# Altium footprint library Components.PcbLib: 82 footprints (part 4 of 6)
Each footprint in its own frame and in the unit in brackets; x right, y up, seen from the top. Pads: shape width x height; smd on the part's side, far side on the other; paste and mask are expansions set on the pad; w line width, h text height; cw(c..) or ccw(c..) is an arc to the next point about the centre after c.
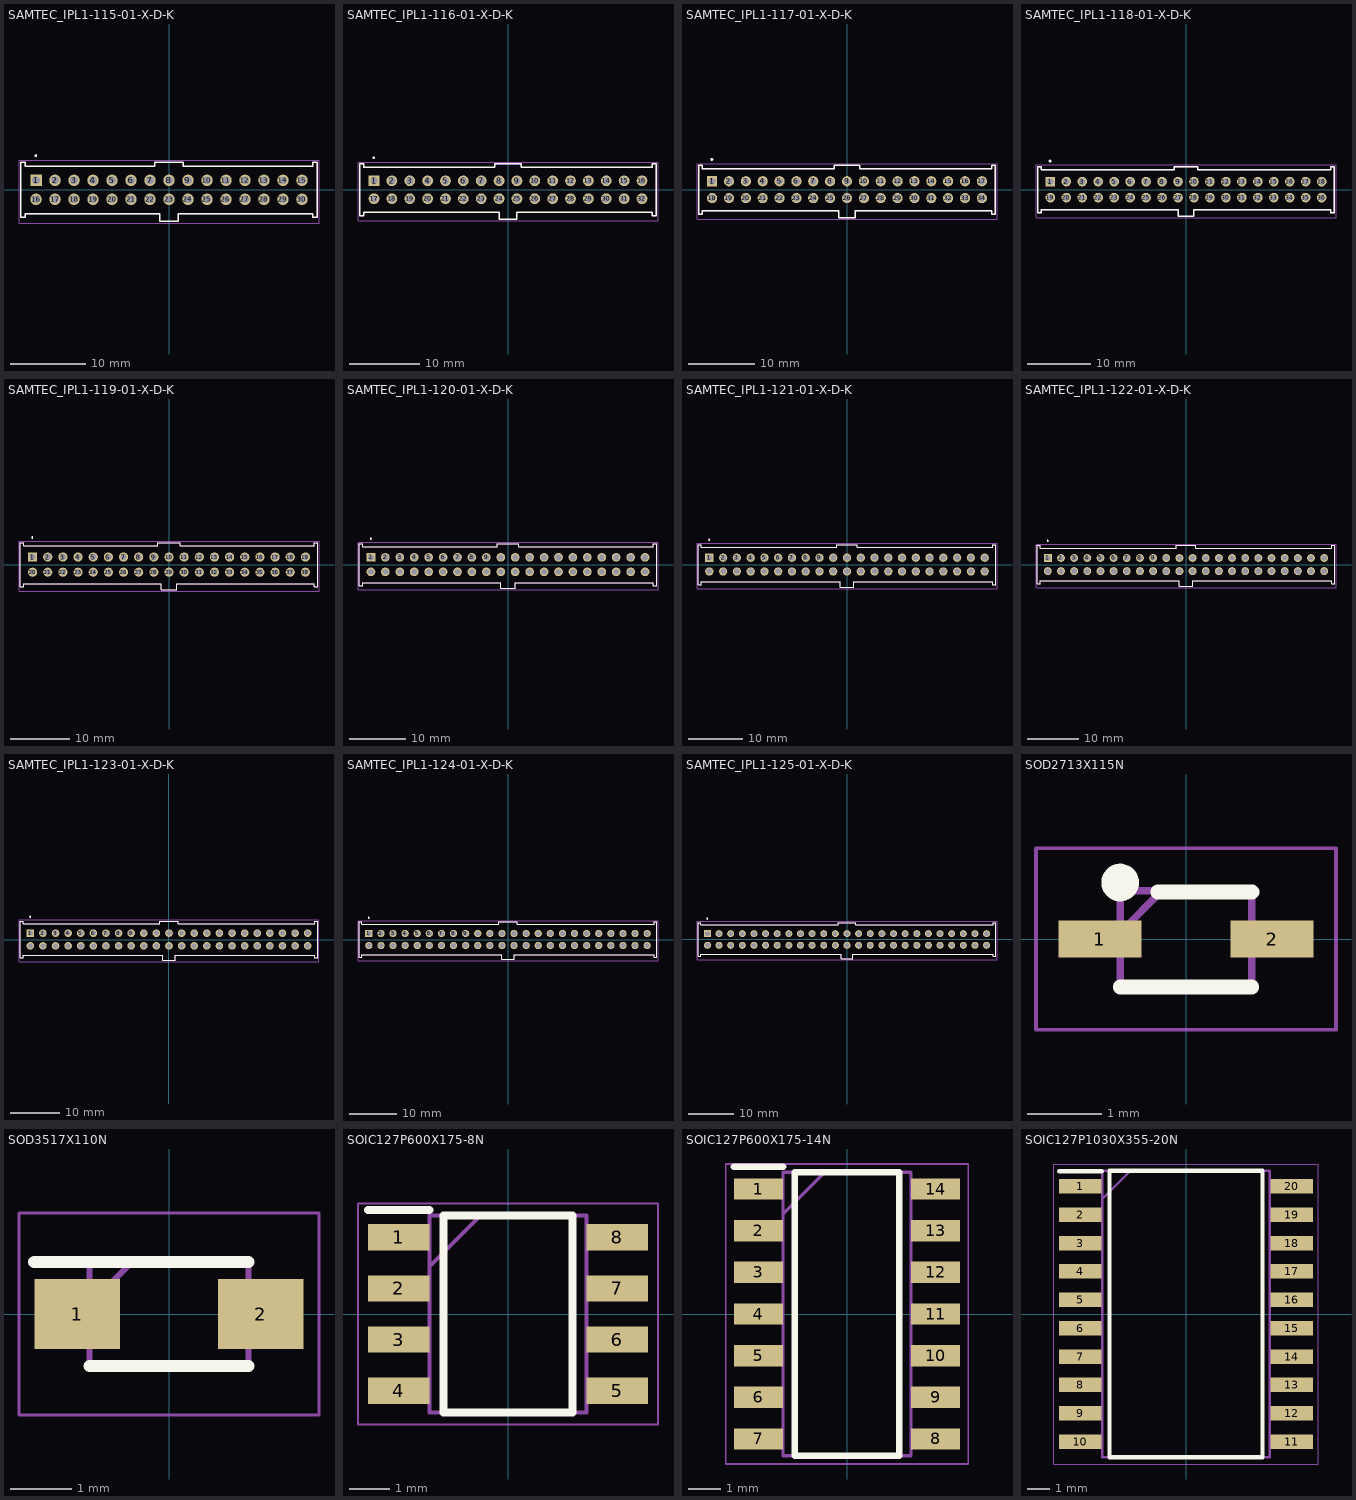
[diagram p3: the footprints below, top view; thin cyan lines are the x and y axes]

## SAMTEC_IPL1-115-01-X-D-K [mm] "Samtec IPL1-115-01-X-D-K, Mini Mate 2.54 mm double row vertical TH shrouded header, keyed"
pads (30):
  rect 1.53x1.53 hole 1.02: 1(-17.78,1.27)
  round 1.53 hole 1.02: 2(-15.24,1.27) 3(-12.7,1.27) 4(-10.16,1.27) 5(-7.62,1.27) 6(-5.08,1.27) 7(-2.54,1.27) 8(0,1.27) 9(2.54,1.27) 10(5.08,1.27) 11(7.62,1.27) 12(10.16,1.27) 13(12.7,1.27) 14(15.24,1.27) 15(17.78,1.27) 16(-17.78,-1.27) 17(-15.24,-1.27) 18(-12.7,-1.27) 19(-10.16,-1.27) 20(-7.62,-1.27) 21(-5.08,-1.27) 22(-2.54,-1.27) 23(0,-1.27) 24(2.54,-1.27) 25(5.08,-1.27) 26(7.62,-1.27) 27(10.16,-1.27) 28(12.7,-1.27) 29(15.24,-1.27) 30(17.78,-1.27)
Top Overlay:
  circle w0.2: c-17.82,4.555 r0.1
  lines w0.2: -19.81,-3.685 -19.81,3.685 -19.24,3.685 -19.24,3.175 -1.905,3.175 -1.905,3.685 1.905,3.685 1.905,3.175 19.24,3.175 19.24,3.685 19.81,3.685 19.81,-3.685 19.24,-3.685 19.24,-3.175 1.27,-3.175 1.27,-4.195 -1.27,-4.195 -1.27,-3.175 -19.24,-3.175 -19.24,-3.685 -19.81,-3.685
Mechanical 13:
  circle w0.2: c-17.82,4.555 r0.1
  lines w0.1: -19.81,-3.685 -19.81,3.685 -19.24,3.685 -19.24,3.175 -1.905,3.175 -1.905,3.685 1.905,3.685 1.905,3.175 19.24,3.175 19.24,3.685 19.81,3.685 19.81,-3.685 19.24,-3.685 19.24,-3.175 1.27,-3.175 1.27,-4.195 -1.27,-4.195 -1.27,-3.175 -19.24,-3.175 -19.24,-3.685 -19.81,-3.685
Mechanical 15:
  lines w0.05: -20.06,-4.445 -20.06,3.935 20.06,3.935 20.06,-4.445 -20.06,-4.445
3D body "IPL1-115-01-L-D-K.stp": height 8.13, standoff -3.05, extent -19.812,-4.191 19.812,3.683

## SAMTEC_IPL1-116-01-X-D-K [mm] "Samtec IPL1-116-01-X-D-K, Mini Mate 2.54 mm double row vertical TH shrouded header, keyed"
pads (32):
  rect 1.53x1.53 hole 1.02: 1(-19.05,1.27)
  round 1.53 hole 1.02: 2(-16.51,1.27) 3(-13.97,1.27) 4(-11.43,1.27) 5(-8.89,1.27) 6(-6.35,1.27) 7(-3.81,1.27) 8(-1.27,1.27) 9(1.27,1.27) 10(3.81,1.27) 11(6.35,1.27) 12(8.89,1.27) 13(11.43,1.27) 14(13.97,1.27) 15(16.51,1.27) 16(19.05,1.27) 17(-19.05,-1.27) 18(-16.51,-1.27) 19(-13.97,-1.27) 20(-11.43,-1.27) 21(-8.89,-1.27) 22(-6.35,-1.27) 23(-3.81,-1.27) 24(-1.27,-1.27) 25(1.27,-1.27) 26(3.81,-1.27) 27(6.35,-1.27) 28(8.89,-1.27) 29(11.43,-1.27) 30(13.97,-1.27) 31(16.51,-1.27) 32(19.05,-1.27)
Top Overlay:
  circle w0.2: c-19.09,4.555 r0.1
  lines w0.2: -21.08,-3.685 -21.08,3.685 -20.51,3.685 -20.51,3.175 -1.905,3.175 -1.905,3.685 1.905,3.685 1.905,3.175 20.51,3.175 20.51,3.685 21.08,3.685 21.08,-3.685 20.51,-3.685 20.51,-3.175 1.27,-3.175 1.27,-4.195 -1.27,-4.195 -1.27,-3.175 -20.51,-3.175 -20.51,-3.685 -21.08,-3.685
Mechanical 13:
  circle w0.2: c-19.09,4.555 r0.1
  lines w0.1: -21.08,-3.685 -21.08,3.685 -20.51,3.685 -20.51,3.175 -1.905,3.175 -1.905,3.685 1.905,3.685 1.905,3.175 20.51,3.175 20.51,3.685 21.08,3.685 21.08,-3.685 20.51,-3.685 20.51,-3.175 1.27,-3.175 1.27,-4.195 -1.27,-4.195 -1.27,-3.175 -20.51,-3.175 -20.51,-3.685 -21.08,-3.685
Mechanical 15:
  lines w0.05: -21.33,-4.445 -21.33,3.935 21.33,3.935 21.33,-4.445 -21.33,-4.445
3D body "IPL1-116-01-L-D-K.stp": height 8.13, standoff -3.05, extent -21.082,-4.191 21.082,3.683

## SAMTEC_IPL1-117-01-X-D-K [mm] "Samtec IPL1-117-01-X-D-K, Mini Mate 2.54 mm double row vertical TH shrouded header, keyed"
pads (34):
  rect 1.53x1.53 hole 1.02: 1(-20.32,1.27)
  round 1.53 hole 1.02: 2(-17.78,1.27) 3(-15.24,1.27) 4(-12.7,1.27) 5(-10.16,1.27) 6(-7.62,1.27) 7(-5.08,1.27) 8(-2.54,1.27) 9(0,1.27) 10(2.54,1.27) 11(5.08,1.27) 12(7.62,1.27) 13(10.16,1.27) 14(12.7,1.27) 15(15.24,1.27) 16(17.78,1.27) 17(20.32,1.27) 18(-20.32,-1.27) 19(-17.78,-1.27) 20(-15.24,-1.27) 21(-12.7,-1.27) 22(-10.16,-1.27) 23(-7.62,-1.27) 24(-5.08,-1.27) 25(-2.54,-1.27) 26(0,-1.27) 27(2.54,-1.27) 28(5.08,-1.27) 29(7.62,-1.27) 30(10.16,-1.27) 31(12.7,-1.27) 32(15.24,-1.27) 33(17.78,-1.27) 34(20.32,-1.27)
Top Overlay:
  circle w0.2: c-20.36,4.555 r0.1
  lines w0.2: -22.35,-3.685 -22.35,3.685 -21.78,3.685 -21.78,3.175 -1.905,3.175 -1.905,3.685 1.905,3.685 1.905,3.175 21.78,3.175 21.78,3.685 22.35,3.685 22.35,-3.685 21.78,-3.685 21.78,-3.175 1.27,-3.175 1.27,-4.195 -1.27,-4.195 -1.27,-3.175 -21.78,-3.175 -21.78,-3.685 -22.35,-3.685
Mechanical 13:
  circle w0.2: c-20.36,4.555 r0.1
  lines w0.1: -22.35,-3.685 -22.35,3.685 -21.78,3.685 -21.78,3.175 -1.905,3.175 -1.905,3.685 1.905,3.685 1.905,3.175 21.78,3.175 21.78,3.685 22.35,3.685 22.35,-3.685 21.78,-3.685 21.78,-3.175 1.27,-3.175 1.27,-4.195 -1.27,-4.195 -1.27,-3.175 -21.78,-3.175 -21.78,-3.685 -22.35,-3.685
Mechanical 15:
  lines w0.05: -22.6,-4.445 -22.6,3.935 22.6,3.935 22.6,-4.445 -22.6,-4.445
3D body "IPL1-117-01-L-D-K.stp": height 8.13, standoff -3.05, extent -22.352,-4.191 22.352,3.683

## SAMTEC_IPL1-118-01-X-D-K [mm] "Samtec IPL1-118-01-X-D-K, Mini Mate 2.54 mm double row vertical TH shrouded header, keyed"
pads (36):
  rect 1.53x1.53 hole 1.02: 1(-21.59,1.27)
  round 1.53 hole 1.02: 2(-19.05,1.27) 3(-16.51,1.27) 4(-13.97,1.27) 5(-11.43,1.27) 6(-8.89,1.27) 7(-6.35,1.27) 8(-3.81,1.27) 9(-1.27,1.27) 10(1.27,1.27) 11(3.81,1.27) 12(6.35,1.27) 13(8.89,1.27) 14(11.43,1.27) 15(13.97,1.27) 16(16.51,1.27) 17(19.05,1.27) 18(21.59,1.27) 19(-21.59,-1.27) 20(-19.05,-1.27) 21(-16.51,-1.27) 22(-13.97,-1.27) 23(-11.43,-1.27) 24(-8.89,-1.27) 25(-6.35,-1.27) 26(-3.81,-1.27) 27(-1.27,-1.27) 28(1.27,-1.27) 29(3.81,-1.27) 30(6.35,-1.27) 31(8.89,-1.27) 32(11.43,-1.27) 33(13.97,-1.27) 34(16.51,-1.27) 35(19.05,-1.27) 36(21.59,-1.27)
Top Overlay:
  circle w0.2: c-21.63,4.555 r0.1
  lines w0.2: -23.62,-3.685 -23.05,-3.685 -23.05,-3.175 -1.27,-3.175 -1.27,-4.195 1.27,-4.195 1.27,-3.175 23.05,-3.175 23.05,-3.685 23.62,-3.685 23.62,3.685 23.05,3.685 23.05,3.175 1.905,3.175 1.905,3.685 -1.905,3.685 -1.905,3.175 -23.05,3.175 -23.05,3.685 -23.62,3.685 -23.62,-3.685
Mechanical 13:
  circle w0.2: c-21.63,4.555 r0.1
  lines w0.1: -23.62,-3.685 -23.05,-3.685 -23.05,-3.175 -1.27,-3.175 -1.27,-4.195 1.27,-4.195 1.27,-3.175 23.05,-3.175 23.05,-3.685 23.62,-3.685 23.62,3.685 23.05,3.685 23.05,3.175 1.905,3.175 1.905,3.685 -1.905,3.685 -1.905,3.175 -23.05,3.175 -23.05,3.685 -23.62,3.685 -23.62,-3.685
Mechanical 15:
  lines w0.05: -23.87,-4.445 23.87,-4.445 23.87,3.935 -23.87,3.935 -23.87,-4.445
3D body "IPL1-118-01-L-D-K.stp": height 8.13, standoff -3.05, extent -23.622,-4.191 23.622,3.683

## SAMTEC_IPL1-119-01-X-D-K [mm] "Samtec IPL1-119-01-X-D-K, Mini Mate 2.54 mm double row vertical TH shrouded header, keyed"
pads (38):
  rect 1.53x1.53 hole 1.02: 1(-22.86,1.27)
  round 1.53 hole 1.02: 2(-20.32,1.27) 3(-17.78,1.27) 4(-15.24,1.27) 5(-12.7,1.27) 6(-10.16,1.27) 7(-7.62,1.27) 8(-5.08,1.27) 9(-2.54,1.27) 10(0,1.27) 11(2.54,1.27) 12(5.08,1.27) 13(7.62,1.27) 14(10.16,1.27) 15(12.7,1.27) 16(15.24,1.27) 17(17.78,1.27) 18(20.32,1.27) 19(22.86,1.27) 20(-22.86,-1.27) 21(-20.32,-1.27) 22(-17.78,-1.27) 23(-15.24,-1.27) 24(-12.7,-1.27) 25(-10.16,-1.27) 26(-7.62,-1.27) 27(-5.08,-1.27) 28(-2.54,-1.27) 29(0,-1.27) 30(2.54,-1.27) 31(5.08,-1.27) 32(7.62,-1.27) 33(10.16,-1.27) 34(12.7,-1.27) 35(15.24,-1.27) 36(17.78,-1.27) 37(20.32,-1.27) 38(22.86,-1.27)
Top Overlay:
  circle w0.2: c-22.9,4.555 r0.1
  lines w0.2: -24.89,-3.685 -24.32,-3.685 -24.32,-3.175 -1.27,-3.175 -1.27,-4.195 1.27,-4.195 1.27,-3.175 24.32,-3.175 24.32,-3.685 24.89,-3.685 24.89,3.685 24.32,3.685 24.32,3.175 1.905,3.175 1.905,3.685 -1.905,3.685 -1.905,3.175 -24.32,3.175 -24.32,3.685 -24.89,3.685 -24.89,-3.685
Mechanical 13:
  circle w0.2: c-22.9,4.555 r0.1
  lines w0.1: -24.89,-3.685 -24.32,-3.685 -24.32,-3.175 -1.27,-3.175 -1.27,-4.195 1.27,-4.195 1.27,-3.175 24.32,-3.175 24.32,-3.685 24.89,-3.685 24.89,3.685 24.32,3.685 24.32,3.175 1.905,3.175 1.905,3.685 -1.905,3.685 -1.905,3.175 -24.32,3.175 -24.32,3.685 -24.89,3.685 -24.89,-3.685
Mechanical 15:
  lines w0.05: -25.14,-4.445 25.14,-4.445 25.14,3.935 -25.14,3.935 -25.14,-4.445
3D body "IPL1-119-01-L-D-K.stp": height 8.13, standoff -3.05, extent -24.892,-4.191 24.892,3.683

## SAMTEC_IPL1-120-01-X-D-K [mm] "Samtec IPL1-120-01-X-D-K, Mini Mate 2.54 mm double row vertical TH shrouded header, keyed"
pads (40):
  rect 1.53x1.53 hole 1.02: 1(-24.13,1.27)
  round 1.53 hole 1.02: 2(-21.59,1.27) 3(-19.05,1.27) 4(-16.51,1.27) 5(-13.97,1.27) 6(-11.43,1.27) 7(-8.89,1.27) 8(-6.35,1.27) 9(-3.81,1.27) 10(-1.27,1.27) 11(1.27,1.27) 12(3.81,1.27) 13(6.35,1.27) 14(8.89,1.27) 15(11.43,1.27) 16(13.97,1.27) 17(16.51,1.27) 18(19.05,1.27) 19(21.59,1.27) 20(24.13,1.27) 21(-24.13,-1.27) 22(-21.59,-1.27) 23(-19.05,-1.27) 24(-16.51,-1.27) 25(-13.97,-1.27) 26(-11.43,-1.27) 27(-8.89,-1.27) 28(-6.35,-1.27) 29(-3.81,-1.27) 30(-1.27,-1.27) 31(1.27,-1.27) 32(3.81,-1.27) 33(6.35,-1.27) 34(8.89,-1.27) 35(11.43,-1.27) 36(13.97,-1.27) 37(16.51,-1.27) 38(19.05,-1.27) 39(21.59,-1.27) 40(24.13,-1.27)
Top Overlay:
  circle w0.2: c-24.17,4.555 r0.1
  lines w0.2: -26.16,-3.685 -26.16,3.685 -25.59,3.685 -25.59,3.175 -1.905,3.175 -1.905,3.685 1.905,3.685 1.905,3.175 25.59,3.175 25.59,3.685 26.16,3.685 26.16,-3.685 25.59,-3.685 25.59,-3.175 1.27,-3.175 1.27,-4.195 -1.27,-4.195 -1.27,-3.175 -25.59,-3.175 -25.59,-3.685 -26.16,-3.685
Mechanical 13:
  circle w0.2: c-24.17,4.555 r0.1
  lines w0.1: -26.16,-3.685 -26.16,3.685 -25.59,3.685 -25.59,3.175 -1.905,3.175 -1.905,3.685 1.905,3.685 1.905,3.175 25.59,3.175 25.59,3.685 26.16,3.685 26.16,-3.685 25.59,-3.685 25.59,-3.175 1.27,-3.175 1.27,-4.195 -1.27,-4.195 -1.27,-3.175 -25.59,-3.175 -25.59,-3.685 -26.16,-3.685
Mechanical 15:
  lines w0.05: -26.41,-4.445 -26.41,3.935 26.41,3.935 26.41,-4.445 -26.41,-4.445
3D body "IPL1-120-01-L-D-K.stp": height 8.13, standoff -3.05, extent -26.162,-4.191 26.162,3.683

## SAMTEC_IPL1-121-01-X-D-K [mm] "Samtec IPL1-121-01-X-D-K, Mini Mate 2.54 mm double row vertical TH shrouded header, keyed"
pads (42):
  rect 1.53x1.53 hole 1.02: 1(-25.4,1.27)
  round 1.53 hole 1.02: 2(-22.86,1.27) 3(-20.32,1.27) 4(-17.78,1.27) 5(-15.24,1.27) 6(-12.7,1.27) 7(-10.16,1.27) 8(-7.62,1.27) 9(-5.08,1.27) 10(-2.54,1.27) 11(0,1.27) 12(2.54,1.27) 13(5.08,1.27) 14(7.62,1.27) 15(10.16,1.27) 16(12.7,1.27) 17(15.24,1.27) 18(17.78,1.27) 19(20.32,1.27) 20(22.86,1.27) 21(25.4,1.27) 22(-25.4,-1.27) 23(-22.86,-1.27) 24(-20.32,-1.27) 25(-17.78,-1.27) 26(-15.24,-1.27) 27(-12.7,-1.27) 28(-10.16,-1.27) 29(-7.62,-1.27) 30(-5.08,-1.27) 31(-2.54,-1.27) 32(0,-1.27) 33(2.54,-1.27) 34(5.08,-1.27) 35(7.62,-1.27) 36(10.16,-1.27) 37(12.7,-1.27) 38(15.24,-1.27) 39(17.78,-1.27) 40(20.32,-1.27) 41(22.86,-1.27) 42(25.4,-1.27)
Top Overlay:
  circle w0.2: c-25.44,4.555 r0.1
  lines w0.2: -27.43,-3.685 -27.43,3.685 -26.86,3.685 -26.86,3.175 -1.905,3.175 -1.905,3.685 1.905,3.685 1.905,3.175 26.86,3.175 26.86,3.685 27.43,3.685 27.43,-3.685 26.86,-3.685 26.86,-3.175 1.27,-3.175 1.27,-4.195 -1.27,-4.195 -1.27,-3.175 -26.86,-3.175 -26.86,-3.685 -27.43,-3.685
Mechanical 13:
  circle w0.2: c-25.44,4.555 r0.1
  lines w0.1: -27.43,-3.685 -27.43,3.685 -26.86,3.685 -26.86,3.175 -1.905,3.175 -1.905,3.685 1.905,3.685 1.905,3.175 26.86,3.175 26.86,3.685 27.43,3.685 27.43,-3.685 26.86,-3.685 26.86,-3.175 1.27,-3.175 1.27,-4.195 -1.27,-4.195 -1.27,-3.175 -26.86,-3.175 -26.86,-3.685 -27.43,-3.685
Mechanical 15:
  lines w0.05: -27.68,-4.445 -27.68,3.935 27.68,3.935 27.68,-4.445 -27.68,-4.445
3D body "IPL1-121-01-L-D-K.stp": height 8.13, standoff -3.05, extent -27.432,-4.191 27.432,3.683

## SAMTEC_IPL1-122-01-X-D-K [mm] "Samtec IPL1-122-01-X-D-K, Mini Mate 2.54 mm double row vertical TH shrouded header, keyed"
pads (44):
  rect 1.53x1.53 hole 1.02: 1(-26.67,1.27)
  round 1.53 hole 1.02: 2(-24.13,1.27) 3(-21.59,1.27) 4(-19.05,1.27) 5(-16.51,1.27) 6(-13.97,1.27) 7(-11.43,1.27) 8(-8.89,1.27) 9(-6.35,1.27) 10(-3.81,1.27) 11(-1.27,1.27) 12(1.27,1.27) 13(3.81,1.27) 14(6.35,1.27) 15(8.89,1.27) 16(11.43,1.27) 17(13.97,1.27) 18(16.51,1.27) 19(19.05,1.27) 20(21.59,1.27) 21(24.13,1.27) 22(26.67,1.27) 23(-26.67,-1.27) 24(-24.13,-1.27) 25(-21.59,-1.27) 26(-19.05,-1.27) 27(-16.51,-1.27) 28(-13.97,-1.27) 29(-11.43,-1.27) 30(-8.89,-1.27) 31(-6.35,-1.27) 32(-3.81,-1.27) 33(-1.27,-1.27) 34(1.27,-1.27) 35(3.81,-1.27) 36(6.35,-1.27) 37(8.89,-1.27) 38(11.43,-1.27) 39(13.97,-1.27) 40(16.51,-1.27) 41(19.05,-1.27) 42(21.59,-1.27) 43(24.13,-1.27) 44(26.67,-1.27)
Top Overlay:
  circle w0.2: c-26.71,4.555 r0.1
  lines w0.2: -28.7,-3.685 -28.7,3.685 -28.13,3.685 -28.13,3.175 -1.905,3.175 -1.905,3.685 1.905,3.685 1.905,3.175 28.13,3.175 28.13,3.685 28.7,3.685 28.7,-3.685 28.13,-3.685 28.13,-3.175 1.27,-3.175 1.27,-4.195 -1.27,-4.195 -1.27,-3.175 -28.13,-3.175 -28.13,-3.685 -28.7,-3.685
Mechanical 13:
  circle w0.2: c-26.71,4.555 r0.1
  lines w0.1: -28.7,-3.685 -28.7,3.685 -28.13,3.685 -28.13,3.175 -1.905,3.175 -1.905,3.685 1.905,3.685 1.905,3.175 28.13,3.175 28.13,3.685 28.7,3.685 28.7,-3.685 28.13,-3.685 28.13,-3.175 1.27,-3.175 1.27,-4.195 -1.27,-4.195 -1.27,-3.175 -28.13,-3.175 -28.13,-3.685 -28.7,-3.685
Mechanical 15:
  lines w0.05: -28.95,-4.445 -28.95,3.935 28.95,3.935 28.95,-4.445 -28.95,-4.445
3D body "IPL1-122-01-L-D-K.stp": height 8.13, standoff -3.05, extent -28.702,-4.191 28.702,3.683

## SAMTEC_IPL1-123-01-X-D-K [mm] "Samtec IPL1-123-01-X-D-K, Mini Mate 2.54 mm double row vertical TH shrouded header, keyed"
pads (46):
  rect 1.53x1.53 hole 1.02: 1(-27.94,1.27)
  round 1.53 hole 1.02: 2(-25.4,1.27) 3(-22.86,1.27) 4(-20.32,1.27) 5(-17.78,1.27) 6(-15.24,1.27) 7(-12.7,1.27) 8(-10.16,1.27) 9(-7.62,1.27) 10(-5.08,1.27) 11(-2.54,1.27) 12(0,1.27) 13(2.54,1.27) 14(5.08,1.27) 15(7.62,1.27) 16(10.16,1.27) 17(12.7,1.27) 18(15.24,1.27) 19(17.78,1.27) 20(20.32,1.27) 21(22.86,1.27) 22(25.4,1.27) 23(27.94,1.27) 24(-27.94,-1.27) 25(-25.4,-1.27) 26(-22.86,-1.27) 27(-20.32,-1.27) 28(-17.78,-1.27) 29(-15.24,-1.27) 30(-12.7,-1.27) 31(-10.16,-1.27) 32(-7.62,-1.27) 33(-5.08,-1.27) 34(-2.54,-1.27) 35(0,-1.27) 36(2.54,-1.27) 37(5.08,-1.27) 38(7.62,-1.27) 39(10.16,-1.27) 40(12.7,-1.27) 41(15.24,-1.27) 42(17.78,-1.27) 43(20.32,-1.27) 44(22.86,-1.27) 45(25.4,-1.27) 46(27.94,-1.27)
Top Overlay:
  circle w0.2: c-27.98,4.555 r0.1
  lines w0.2: -29.97,-3.685 -29.97,3.685 -29.4,3.685 -29.4,3.175 -1.905,3.175 -1.905,3.685 1.905,3.685 1.905,3.175 29.4,3.175 29.4,3.685 29.97,3.685 29.97,-3.685 29.4,-3.685 29.4,-3.175 1.27,-3.175 1.27,-4.195 -1.27,-4.195 -1.27,-3.175 -29.4,-3.175 -29.4,-3.685 -29.97,-3.685
Mechanical 13:
  circle w0.2: c-27.98,4.555 r0.1
  lines w0.1: -29.97,-3.685 -29.97,3.685 -29.4,3.685 -29.4,3.175 -1.905,3.175 -1.905,3.685 1.905,3.685 1.905,3.175 29.4,3.175 29.4,3.685 29.97,3.685 29.97,-3.685 29.4,-3.685 29.4,-3.175 1.27,-3.175 1.27,-4.195 -1.27,-4.195 -1.27,-3.175 -29.4,-3.175 -29.4,-3.685 -29.97,-3.685
Mechanical 15:
  lines w0.05: -30.22,-4.445 -30.22,3.935 30.22,3.935 30.22,-4.445 -30.22,-4.445
3D body "IPL1-123-01-L-D-K.stp": height 8.13, standoff -3.05, extent -29.972,-4.191 29.972,3.683

## SAMTEC_IPL1-124-01-X-D-K [mm] "Samtec IPL1-124-01-X-D-K, Mini Mate 2.54 mm double row vertical TH shrouded header, keyed"
pads (48):
  rect 1.53x1.53 hole 1.02: 1(-29.21,1.27)
  round 1.53 hole 1.02: 2(-26.67,1.27) 3(-24.13,1.27) 4(-21.59,1.27) 5(-19.05,1.27) 6(-16.51,1.27) 7(-13.97,1.27) 8(-11.43,1.27) 9(-8.89,1.27) 10(-6.35,1.27) 11(-3.81,1.27) 12(-1.27,1.27) 13(1.27,1.27) 14(3.81,1.27) 15(6.35,1.27) 16(8.89,1.27) 17(11.43,1.27) 18(13.97,1.27) 19(16.51,1.27) 20(19.05,1.27) 21(21.59,1.27) 22(24.13,1.27) 23(26.67,1.27) 24(29.21,1.27) 25(-29.21,-1.27) 26(-26.67,-1.27) 27(-24.13,-1.27) 28(-21.59,-1.27) 29(-19.05,-1.27) 30(-16.51,-1.27) 31(-13.97,-1.27) 32(-11.43,-1.27) 33(-8.89,-1.27) 34(-6.35,-1.27) 35(-3.81,-1.27) 36(-1.27,-1.27) 37(1.27,-1.27) 38(3.81,-1.27) 39(6.35,-1.27) 40(8.89,-1.27) 41(11.43,-1.27) 42(13.97,-1.27) 43(16.51,-1.27) 44(19.05,-1.27) 45(21.59,-1.27) 46(24.13,-1.27) 47(26.67,-1.27) 48(29.21,-1.27)
Top Overlay:
  circle w0.2: c-29.25,4.555 r0.1
  lines w0.2: -31.24,-3.685 -30.67,-3.685 -30.67,-3.175 -1.27,-3.175 -1.27,-4.195 1.27,-4.195 1.27,-3.175 30.67,-3.175 30.67,-3.685 31.24,-3.685 31.24,3.685 30.67,3.685 30.67,3.175 1.905,3.175 1.905,3.685 -1.905,3.685 -1.905,3.175 -30.67,3.175 -30.67,3.685 -31.24,3.685 -31.24,-3.685
Mechanical 13:
  circle w0.2: c-29.25,4.555 r0.1
  lines w0.1: -31.24,-3.685 -30.67,-3.685 -30.67,-3.175 -1.27,-3.175 -1.27,-4.195 1.27,-4.195 1.27,-3.175 30.67,-3.175 30.67,-3.685 31.24,-3.685 31.24,3.685 30.67,3.685 30.67,3.175 1.905,3.175 1.905,3.685 -1.905,3.685 -1.905,3.175 -30.67,3.175 -30.67,3.685 -31.24,3.685 -31.24,-3.685
Mechanical 15:
  lines w0.05: -31.49,-4.445 31.49,-4.445 31.49,3.935 -31.49,3.935 -31.49,-4.445
3D body "IPL1-124-01-L-D-K.stp": height 8.13, standoff -3.05, extent -31.242,-4.191 31.242,3.683

## SAMTEC_IPL1-125-01-X-D-K [mm] "Samtec IPL1-125-01-X-D-K, Mini Mate 2.54 mm double row vertical TH shrouded header, keyed"
pads (50):
  rect 1.53x1.53 hole 1.02: 1(-30.48,1.27)
  round 1.53 hole 1.02: 2(-27.94,1.27) 3(-25.4,1.27) 4(-22.86,1.27) 5(-20.32,1.27) 6(-17.78,1.27) 7(-15.24,1.27) 8(-12.7,1.27) 9(-10.16,1.27) 10(-7.62,1.27) 11(-5.08,1.27) 12(-2.54,1.27) 13(0,1.27) 14(2.54,1.27) 15(5.08,1.27) 16(7.62,1.27) 17(10.16,1.27) 18(12.7,1.27) 19(15.24,1.27) 20(17.78,1.27) 21(20.32,1.27) 22(22.86,1.27) 23(25.4,1.27) 24(27.94,1.27) 25(30.48,1.27) 26(-30.48,-1.27) 27(-27.94,-1.27) 28(-25.4,-1.27) 29(-22.86,-1.27) 30(-20.32,-1.27) 31(-17.78,-1.27) 32(-15.24,-1.27) 33(-12.7,-1.27) 34(-10.16,-1.27) 35(-7.62,-1.27) 36(-5.08,-1.27) 37(-2.54,-1.27) 38(0,-1.27) 39(2.54,-1.27) 40(5.08,-1.27) 41(7.62,-1.27) 42(10.16,-1.27) 43(12.7,-1.27) 44(15.24,-1.27) 45(17.78,-1.27) 46(20.32,-1.27) 47(22.86,-1.27) 48(25.4,-1.27) 49(27.94,-1.27) 50(30.48,-1.27)
Top Overlay:
  circle w0.2: c-30.52,4.555 r0.1
  lines w0.2: -32.51,-3.685 -31.94,-3.685 -31.94,-3.175 -1.27,-3.175 -1.27,-4.195 1.27,-4.195 1.27,-3.175 31.94,-3.175 31.94,-3.685 32.51,-3.685 32.51,3.685 31.94,3.685 31.94,3.175 1.905,3.175 1.905,3.685 -1.905,3.685 -1.905,3.175 -31.94,3.175 -31.94,3.685 -32.51,3.685 -32.51,-3.685
Mechanical 13:
  circle w0.2: c-30.52,4.555 r0.1
  lines w0.1: -32.51,-3.685 -31.94,-3.685 -31.94,-3.175 -1.27,-3.175 -1.27,-4.195 1.27,-4.195 1.27,-3.175 31.94,-3.175 31.94,-3.685 32.51,-3.685 32.51,3.685 31.94,3.685 31.94,3.175 1.905,3.175 1.905,3.685 -1.905,3.685 -1.905,3.175 -31.94,3.175 -31.94,3.685 -32.51,3.685 -32.51,-3.685
Mechanical 15:
  lines w0.05: -32.76,-4.445 32.76,-4.445 32.76,3.935 -32.76,3.935 -32.76,-4.445
3D body "IPL1-125-01-L-D-K.stp": height 8.13, standoff -3.05, extent -32.512,-4.191 32.512,3.683

## SOD2713X115N [mm]
pads (2):
  rect 1.125x0.5 smd: 1(-1.162,0) 2(1.162,0)
Top Overlay:
  circle w0.254: c-0.889,0.762 r0.127
  lines w0.2: -0.888,-0.65 0.888,-0.65 ; -0.381,0.635 0.889,0.635
Mechanical 13:
  lines w0.1: -0.888,0.088 -0.325,0.65 ; -0.888,-0.65 0.888,-0.65 0.888,0.65 -0.888,0.65 -0.888,-0.65
Mechanical 15:
  lines w0.05: -2.025,-1.225 2.025,-1.225 2.025,1.225 -2.025,1.225 -2.025,-1.225
3D body "BZX384B5V1-E3-18.stp": height 1.15, standoff 0, extent -1.338,-0.65 1.338,0.65

## SOD3517X110N [mm]
pads (2):
  rect 1.4x1.15 smd: 1(-1.5,0) 2(1.5,0)
Top Overlay:
  lines w0.2: -2.2,0.85 1.3,0.85 ; -1.3,-0.85 1.3,-0.85
Mechanical 13:
  lines w0.1: -1.3,0.15 -0.6,0.85 ; -1.3,-0.85 1.3,-0.85 1.3,0.85 -1.3,0.85 -1.3,-0.85
Mechanical 15:
  lines w0.05: -2.45,-1.65 2.45,-1.65 2.45,1.65 -2.45,1.65 -2.45,-1.65
3D body "PMEG6010ELR.stp": height 1.07, standoff 0, extent -1.748,-1.069 1.752,0.931

## SOIC127P600X175-8N [mm]
pads (8):
  rect 1.525x0.65 smd: 1(-2.712,1.905) 2(-2.712,0.635) 3(-2.712,-0.635) 4(-2.712,-1.905) 5(2.712,-1.905) 6(2.712,-0.635) 7(2.712,0.635) 8(2.712,1.905)
Top Overlay:
  lines w0.2: -3.475,2.58 -1.95,2.58 ; -1.6,-2.45 1.6,-2.45 1.6,2.45 -1.6,2.45 -1.6,-2.45
Mechanical 13:
  lines w0.1: -1.95,1.18 -0.68,2.45 ; -1.95,-2.45 1.95,-2.45 1.95,2.45 -1.95,2.45 -1.95,-2.45
Mechanical 15:
  lines w0.05: -3.725,-2.75 3.725,-2.75 3.725,2.75 -3.725,2.75 -3.725,-2.75
3D body "NE555DR.stp": height 1.75, standoff 0, extent -3,-2.45 3,2.45

## SOIC127P600X175-14N [mm]
pads (14):
  rect 1.5x0.65 smd: 1(-2.7,3.81) 2(-2.7,2.54) 3(-2.7,1.27) 4(-2.7,0) 5(-2.7,-1.27) 6(-2.7,-2.54) 7(-2.7,-3.81) 8(2.7,-3.81) 9(2.7,-2.54) 10(2.7,-1.27) 11(2.7,0) 12(2.7,1.27) 13(2.7,2.54) 14(2.7,3.81)
Top Overlay:
  lines w0.2: -3.45,4.485 -1.95,4.485 ; -1.6,-4.325 -1.6,4.325 1.6,4.325 1.6,-4.325 -1.6,-4.325
Mechanical 13:
  lines w0.1: -1.95,3.055 -0.68,4.325 ; -1.95,-4.325 -1.95,4.325 1.95,4.325 1.95,-4.325 -1.95,-4.325
Mechanical 15:
  lines w0.05: -3.7,-4.575 -3.7,4.575 3.7,4.575 3.7,-4.575 -3.7,-4.575
3D body "MCP2518FDT-E_SL.stp": height 1.75, standoff 0, extent -3,-4.325 3,4.325

## SOIC127P1030X355-20N [mm]
pads (20):
  rect 1.9x0.65 smd: 1(-4.725,5.715) 2(-4.725,4.445) 3(-4.725,3.175) 4(-4.725,1.905) 5(-4.725,0.635) 6(-4.725,-0.635) 7(-4.725,-1.905) 8(-4.725,-3.175) 9(-4.725,-4.445) 10(-4.725,-5.715) 11(4.725,-5.715) 12(4.725,-4.445) 13(4.725,-3.175) 14(4.725,-1.905) 15(4.725,-0.635) 16(4.725,0.635) 17(4.725,1.905) 18(4.725,3.175) 19(4.725,4.445) 20(4.725,5.715)
Top Overlay:
  lines w0.2: -5.675,6.39 -3.775,6.39 ; -3.425,-6.415 3.425,-6.415 3.425,6.415 -3.425,6.415 -3.425,-6.415
Mechanical 13:
  lines w0.1: -3.75,5.145 -2.48,6.415 ; -3.75,-6.415 3.75,-6.415 3.75,6.415 -3.75,6.415 -3.75,-6.415
Mechanical 15:
  lines w0.05: -5.925,-6.715 5.925,-6.715 5.925,6.715 -5.925,6.715 -5.925,-6.715
3D body "ISOW1044BDFMR.stp": height 3.55, standoff 0, extent -5.15,-6.415 5.15,6.415